# Altium schematic symbol library ES1J.SchLib: 1 symbol
Pins are listed as number, name and electrical type; pins without a type are passive.

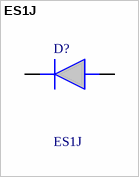
[diagram p0: symbol ES1J]

## ES1J
designator D?
Fairchild ES1J SMT Fast Recovery Diode, 600V 1A, 35ns, 2-Pin DO-214AC; Manufacturer_Name: onsemi; Geometry.Height: 2.5mm; Manufacturer_Part_Number: ES1J; Mouser Part Number: 512-ES1J; Mouser Price/Stock: https://www.mouser.co.uk/ProductDetail/onsemi-Fairchild/ES1J?qs=ZaZfTJZxiphg%252BqNC2EhLqQ%3D%3D; Arrow Part Number: ES1J; Arrow Price/Stock: https://www.arrow.com/en/products/es1j/on-semiconductor?utm_currency=USD&region=nac; Datasheet Link: https://www.onsemi.com/pub/Collateral/ES1J-D.PDF
footprint DIOM5227X250N
pins: 1 K, 2 A